# Altium footprint library Switch$.PcbLib: 117 footprints (part 6 of 8)
Each footprint in its own frame and in the unit in brackets; x right, y up, seen from the top. Pads: shape width x height; smd on the part's side, far side on the other; paste and mask are expansions set on the pad; w line width, h text height; cw(c..) or ccw(c..) is an arc to the next point about the centre after c.
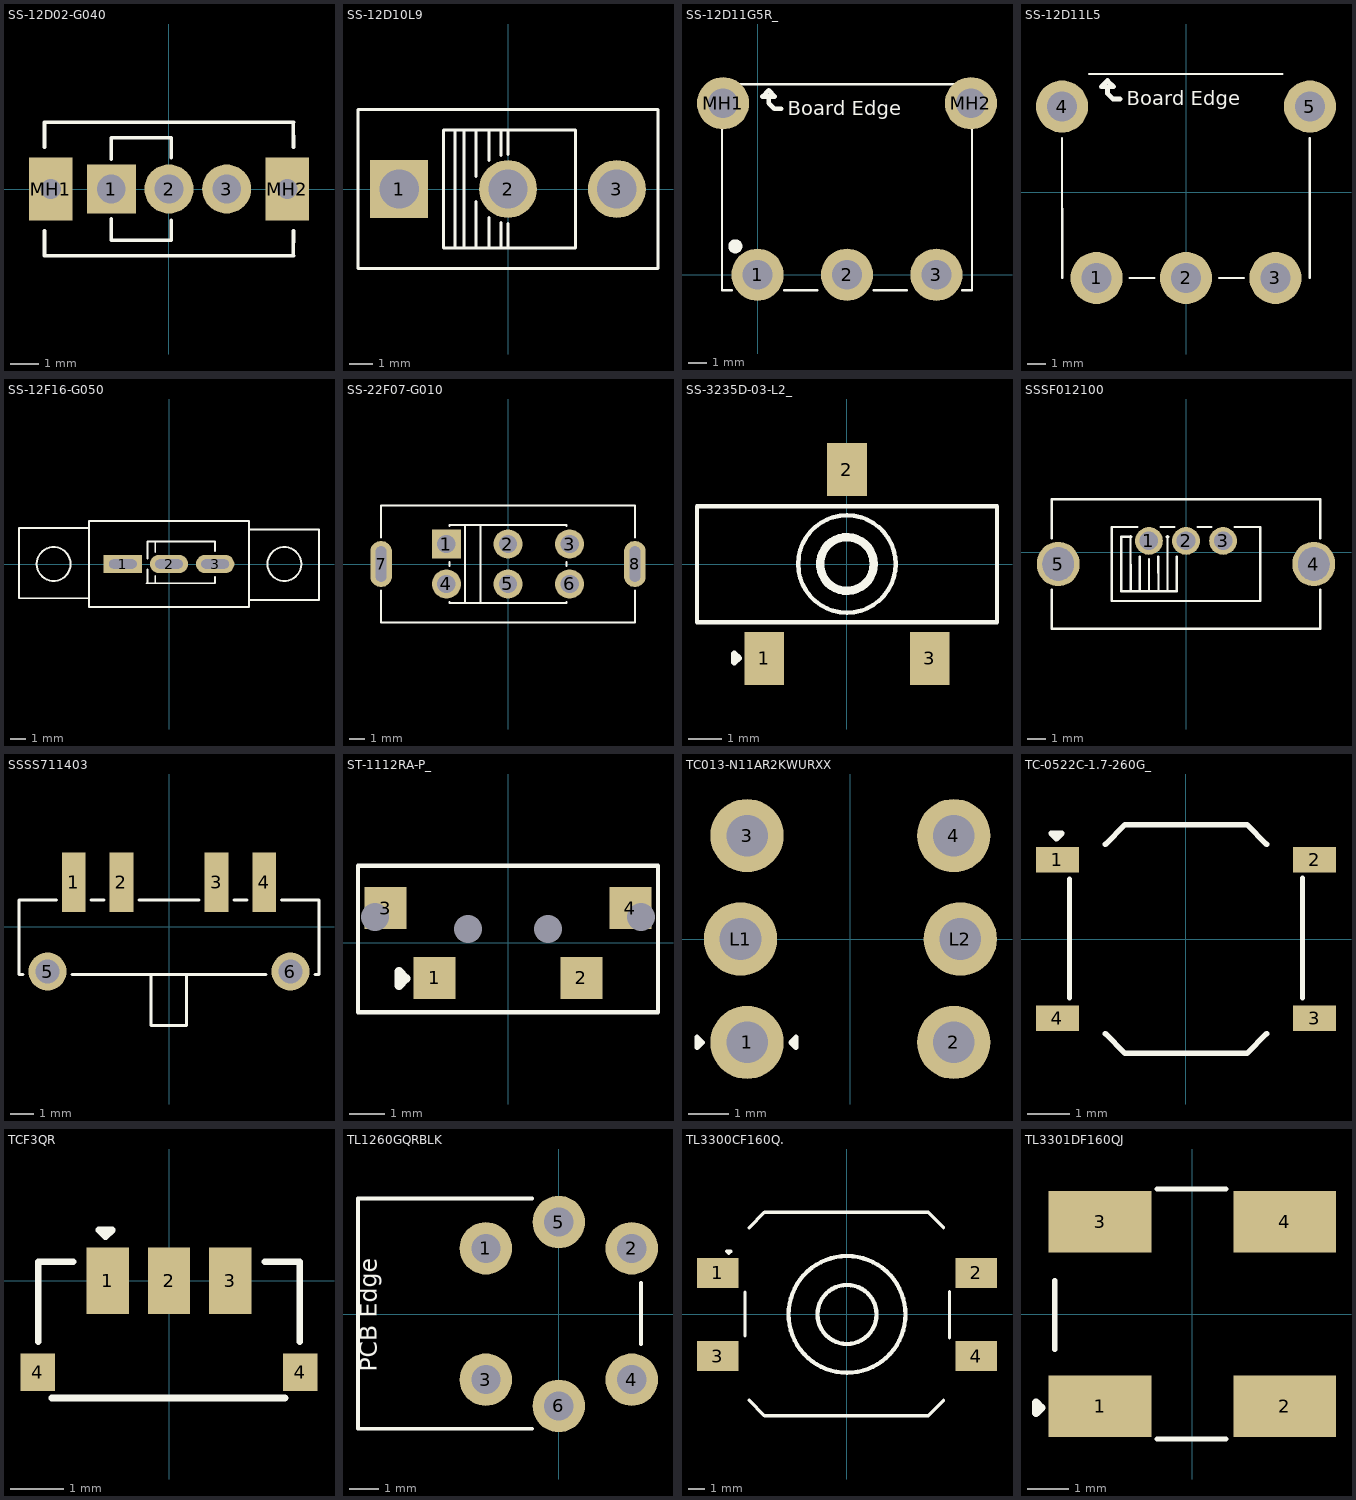
[diagram p5: the footprints below, top view; thin cyan lines are the x and y axes]

## SS-12D02-G040 [mm]
pads (5):
  rect 1.7x1.7 hole 1: 1(-2,0)
  round 1.7 hole 1: 2(0,0) 3(2,0)
  rect 1.5x2.2 hole 0.7 square: MH1(-4.1,0) MH2(4.1,0)
Top Overlay:
  lines w0.127: -4.318,-2.311 -4.315,-1.444 ; -4.318,2.311 -4.315,1.444 ; -4.315,-2.311 4.315,-2.311 ; -4.315,2.311 4.315,2.311 ; -2,1.041 -2,1.778 0.083,1.778 0.083,1.092 ; 4.312,-2.311 4.315,-1.444 ; 4.312,2.311 4.315,1.444 ; -2,-1.778 0.083,-1.778 ; -2,-1.778 -2,-1.041 -2,-1.778 ; -2,-1.778 0.083,-1.778 ; 0.083,-1.778 0.083,-1.092 0.083,-1.778
3D body "G-Switch SS-12D02-G040.STEP": height 9.47, standoff -2.65, extent -4.324,-2.247 4.276,2.253

## SS-12D10L9 [mm]
pads (3):
  rect 2.5x2.5 hole 1.7 paste-2539.97 mask+0.051: 1(-4.7,0)
  round 2.5 hole 1.7 paste-2539.97 mask+0.051: 2(0,0) 3(4.7,0)
Top Overlay:
  lines w0.127: -1.376,-2.54 -1.376,-0.544 ; -1.376,0.544 -1.376,2.54 ; -0.817,-2.54 -0.817,-1.235 ; -0.817,1.235 -0.817,2.54 ; -0.309,-2.54 -0.309,-1.448 ; -0.309,1.448 -0.309,2.54 ; -0.004,-2.54 -0.004,-1.481 ; -0.004,1.481 -0.004,2.54 ; -6.477,-3.429 6.477,-3.429 6.477,3.429 -6.477,3.429 -6.477,-3.429 ; -2.794,-2.54 2.921,-2.54 2.921,2.54 -2.794,2.54 -2.794,-2.54 ; -2.286,-2.54 -1.905,-2.54 -1.905,2.54 -2.286,2.54 -2.286,-2.54
3D body "SS-12D10L9.step": height 16, standoff -6, extent -6.5,-3.7 6.501,3.7

## SS-12D11G5R_ [mm]
pads (5):
  round 2.8 hole 1.6: 1(0,0) 2(4.8,0) 3(9.6,0) MH1(-1.85,9.2) MH2(11.45,9.2)
Top Overlay:
  circle w0.5: c-1.194,1.524 r0.127
  lines w0.127: -1.906,8.156 -1.906,-0.836 -1.372,-0.836 ; -1.474,10.213 11.074,10.213 ; 1.422,-0.836 3.2,-0.836 ; 6.222,-0.836 8,-0.836 ; 10.972,-0.836 11.506,-0.836 11.506,8.156
  lines w0.254: 0.597,9.563 0.597,9.2 0.889,8.908 1.269,8.908 ; 0.267,9.563 0.597,9.893 0.927,9.563 0.267,9.563
  text "Board Edge" at 1.625,8.562 h0.76
3D body "User Library-1103M2S3ABE2.step": height 6.85, standoff -3.15, extent -1.85,-0.789 11.5,14.903

## SS-12D11L5 [mm]
pads (5):
  round 2.8 hole 1.6: 1(-4.8,-4.6) 2(0,-4.6) 3(4.8,-4.6) 4(-6.65,4.6) 5(6.65,4.6)
Top Overlay:
  lines w0.127: -6.655,2.896 -6.65,-4.6 ; -5.207,6.35 5.182,6.35 ; -3.022,-4.6 -1.704,-4.6 ; 1.778,-4.6 3.096,-4.6 ; 6.645,2.896 6.65,-4.6
  lines w0.254: -4.216,5.664 -4.216,5.301 -3.924,5.009 -3.544,5.009 ; -4.547,5.664 -4.216,5.994 -3.886,5.664 -4.547,5.664
  text "Board Edge" at -3.188,4.663 h0.76
3D body "SS-12D11L5.STEP": height 7.1, standoff -2.8, extent -6.699,-5.213 6.801,13.237

## SS-12F16-G050 [mm]
pads (3):
  rect 2.5x1.2 hole 0.6 slot 1.8 at 0 deg paste-2539.97 mask+0.05: 1(-3,0)
  oval 2.5x1.2 hole 0.6 slot 1.8 at 0 deg paste-2539.97 mask+0.05: 2(0,0) 3(3,0)
Top Overlay:
  circle w0.127: c-7.5,0 r1.1
  circle w0.127: c7.5,0 r1.1
  lines w0.127: -5.207,-2.227 -9.75,-2.227 -9.75,2.35 -5.207,2.35 ; -1.45,-1.25 3,-1.25 3,-0.831 ; -1.4,-1.2 -1.4,-0.355 ; -1.4,0.355 -1.4,1.45 3,1.45 3,0.831 ; -0.893,-1.25 -0.893,-0.795 ; -0.893,0.795 -0.893,1.45 ; 5.207,-2.35 9.75,-2.35 9.75,2.228 5.207,2.228 ; -5.207,-2.794 5.207,-2.794 5.207,2.794 -5.207,2.794 -5.207,-2.794
3D body "125.step": height 10.49, standoff -2.5, extent -9.75,-2.8 9.75,2.8

## SS-22F07-G010 [mm]
pads (8):
  rect 1.9x1.9 hole 1.2 paste-2539.97 mask+0.05: 1(-4,1.3)
  round 1.9 hole 1.2 paste-2539.97 mask+0.05: 2(0,1.3) 3(4,1.3) 4(-4,-1.3) 5(0,-1.3) 6(4,-1.3)
  oval 1.4x3 hole 0.7 slot 2.3 at 90 deg paste-2539.97 mask+0.05: 7(-8.25,0) 8(8.25,0)
Top Overlay:
  lines w0.127: -8.255,-1.731 -8.255,-3.81 8.255,-3.81 8.255,-1.731 ; -8.255,1.731 -8.255,3.81 8.255,3.81 8.255,1.731 ; -3.81,-2.466 -3.81,-2.54 3.81,-2.54 3.81,-2.466 ; -3.81,-0.134 -3.81,0.119 ; -3.81,2.481 -3.81,2.54 0,2.54 ; -2.794,-2.54 -2.794,2.54 0,2.54 ; -1.801,-2.54 -1.801,2.54 ; 3.81,-0.134 3.81,0.134 ; 3.81,2.466 3.81,2.54 0,2.54
3D body "C2848924.step": height 19.1, standoff -3, extent -8.5,-3.75 8.5,3.75

## SS-3235D-03-L2_ [mm]
pads (3):
  rect 1.2x1.6 smd: 1(-2.5,-2.85) 3(2.5,-2.85)
  rect 1.21x1.6 smd: 2(0,2.85)
Top Overlay:
  circle w0.254: c0,0 r0.812
  circle w0.127: c0,0 r1.473
  lines w0.127: -4.532,-1.758 4.536,-1.758 4.536,1.747 -4.532,1.747 -4.532,-1.758
  lines w0.2: -3.404,-2.972 -3.277,-2.845 -3.404,-2.718 -3.404,-2.972
3D body "ss-3235d-03-l2.stp": height 6.4, standoff 0, extent -4.499,-3.45 4.551,3.45

## SSSF012100 [mm]
pads (5):
  round 1.5 hole 1 paste-2539.97 mask+0.051: 1(-2,0.625) 2(0,0.625) 3(2,0.625)
  oval 2.3x2.4 hole 1.7 slot 1.8 at 90 deg paste-2539.97 mask+0.051: 4(6.9,-0.625) 5(-6.9,-0.625)
Top Overlay:
  lines w0.127: -7.25,-2.011 -7.25,-4.124 7.25,-4.124 7.25,-2.011 ; -7.25,0.761 -7.25,2.875 7.25,2.875 7.25,0.761 ; -3,0.875 -2.986,-2.1 ; -2.955,0.85 -3.5,0.85 -3.5,-2.1 -0.5,-2.1 -0.5,-0.219 ; -2.631,1.375 -4,1.375 -4,-2.625 4,-2.624 4,1.374 ; -2.5,-0.219 -2.495,-2.1 ; -2,-2.1 -2,-0.356 ; -1.5,-0.219 -1.487,-2.1 ; -1.369,1.375 -0.631,1.375 ; -1.045,0.85 -0.955,0.85 ; -1,-2.1 -1,0.875 ; 0.631,1.375 1.369,1.375 ; 2.631,1.375 4,1.375
3D body "C341735.step": height 17.5, standoff -3.3, extent -7.765,-4.11 7.735,2.891

## SSSS711403 [mm]
pads (6):
  rect 1x2.5 smd paste-100 mask+0.051: 1(-4,1.875) 2(-2,1.875) 3(2,1.875) 4(4,1.875)
  round 1.6 hole 1 paste-2539.97 mask+0.051: 5(-5.1,-1.875) 6(5.1,-1.875)
Top Overlay:
  lines w0.127: -6.124,-2 -6.3,-2 -6.3,1.125 -4.731,1.125 ; -4.077,-2 4.077,-2 ; -3.269,1.125 -2.731,1.125 ; -1.269,1.125 1.269,1.125 ; -0.751,-2.045 -0.751,-4.129 -0.741,-4.138 0.736,-4.138 0.745,-2.026 ; 2.731,1.125 3.269,1.125 ; 4.731,1.125 6.3,1.125 6.3,-2 6.124,-2
Top Paste:
  drawing of 6 lines, arcs and shapes, not listed
3D body "C160877.step": height 2.03, standoff -0.5, extent -6.25,-4 6.25,2.5

## ST-1112RA-P_ [mm]
pads (9):
  rect 1.2x1.2 smd: 1(-2.1,-1) 2(2.1,-1) 3(-3.5,1) 4(3.5,1)
  round 0 hole 0.8: MH(-3.8,0.75) MH(-1.15,0.4) MH(3.8,0.75)
  round 0 hole 0.8 unplated: MH(-1.15,0.4) MH(1.15,0.4)
Top Overlay:
  lines w0.127: -4.293,-1.981 -4.293,2.21 4.293,2.21 4.293,-1.981 -4.293,-1.981
  lines w0.254: -3.124,-1.219 -2.921,-1.016 -3.124,-0.813 -3.124,-1.219
3D body "2009221211_RI-SHENG-ST-1112RA-P_C589180.STEP": height 3.75, standoff -0.35, extent -3.85,-1.379 3.85,2.821

## TC013-N11AR2KWURXX [mm]
pads (6):
  round 1.8 hole 1.02: 1(-2.54,-2.54) 2(2.54,-2.54) 3(-2.54,2.54) 4(2.54,2.54) L1(-2.7,0) L2(2.7,0)
Top Overlay:
  lines w0.127: -3.769,-2.666 -3.642,-2.539 -3.769,-2.412 -3.769,-2.666 ; -1.464,-2.541 -1.337,-2.414 -1.337,-2.668 -1.464,-2.541

## TC-0522C-1.7-260G_ [mm]
pads (4):
  rect 1x0.6 smd: 1(-3,1.85) 2(3,1.85) 3(3,-1.85) 4(-3,-1.85)
Top Overlay:
  lines w0.127: -2.718,-1.372 -2.718,1.397 ; -1.88,-2.21 -1.422,-2.667 1.422,-2.667 1.88,-2.21 ; -1.88,2.21 -1.422,2.667 1.422,2.667 1.88,2.21 ; 2.718,-1.372 2.718,1.422 ; -3.15,2.464 -2.896,2.464 -3.023,2.337 -3.15,2.464
3D body "PTS526 SMG15 SMTR2 LFS--3DModel-STEP-1.STEP": height 1.7, standoff 0, extent -3.2,-2.6 3.2,2.6

## TCF3QR [mm]
pads (5):
  rect 0.8x1.25 smd: 1(-1.15,0) 2(0,0) 3(1.15,0)
  rect 0.65x0.7 smd: 4(-2.475,-1.725) 4(2.475,-1.725)
Top Overlay:
  lines w0.127: -2.464,-1.143 -2.464,0.356 -1.803,0.356 ; -2.21,-2.21 2.184,-2.21 ; 1.803,0.356 2.464,0.356 2.464,-1.143 ; -1.321,0.955 -1.067,0.955 -1.194,0.828 -1.321,0.955
3D body "TCF3QR-1.STEP": height 1, standoff -1.95, extent -2.422,-2.306 2.422,0.305

## TL1260GQRBLK [mm]
pads (6):
  round 1.8 hole 1: 1(-2.5,2.25) 2(2.5,2.25) 3(-2.5,-2.25) 4(2.5,-2.25) 5(0,3.15) 6(0,-3.15)
Top Overlay:
  lines w0.127: -0.914,-3.937 -6.883,-3.937 -6.883,3.962 -0.914,3.962 ; 2.819,-1.041 2.819,1.067
  text "PCB Edge" at -6.031,-1.981 h1
3D body "TL1260GQRBLK.STEP": height 7.65, standoff -3.5, extent -10.531,-4 2.769,4

## TL3300CF160Q. [mm] "SWITCH TACTILE SPST-NO 0.05A 12V"
height 8.5
pads (4):
  rect 2.5x1.8 smd: 1(-7.75,2.5) 2(7.75,2.5) 3(-7.75,-2.5) 4(7.75,-2.5)
Top Overlay:
  circle w0.254: c0,0 r1.771
  circle w0.254: c0,0 r3.503
  lines w0.2: -6.121,-1.295 -6.121,1.342 ; -5.867,-5.156 -4.953,-6.071 4.877,-6.071 5.791,-5.156 ; -5.867,5.207 -4.953,6.121 4.877,6.121 5.791,5.207 ; 6.147,-1.397 6.147,1.368 ; -7.214,3.785 -7.087,3.658 -6.96,3.785 -7.214,3.785
3D body "TL3300CFxxxQ (1).stp": height 8.77, standoff -0.03, extent -7.5,-5.98 7.5,6.02

## TL3301DF160QJ [mm]
pads (4):
  rect 2.5x1.5 smd: 1(-2.25,-2.25) 2(2.25,-2.25) 3(-2.25,2.25) 4(2.25,2.25)
Top Overlay:
  lines w0.127: -3.353,-0.864 -3.353,0.813 ; -0.864,-3.048 0.813,-3.048 ; -0.864,3.048 0.813,3.048
  lines w0.2: -3.81,-2.413 -3.683,-2.286 -3.81,-2.159 -3.81,-2.413
3D body "TL3301DFxxxxJ.stp": height 13.32, standoff 0.02, extent -3.301,-3 3.301,3